# Altium footprint library ACB_PcbLib.PcbLib: 167 footprints (part 9 of 11)
Each footprint in its own frame and in the unit in brackets; x right, y up, seen from the top. Pads: shape width x height; smd on the part's side, far side on the other; paste and mask are expansions set on the pad; w line width, h text height; cw(c..) or ccw(c..) is an arc to the next point about the centre after c.
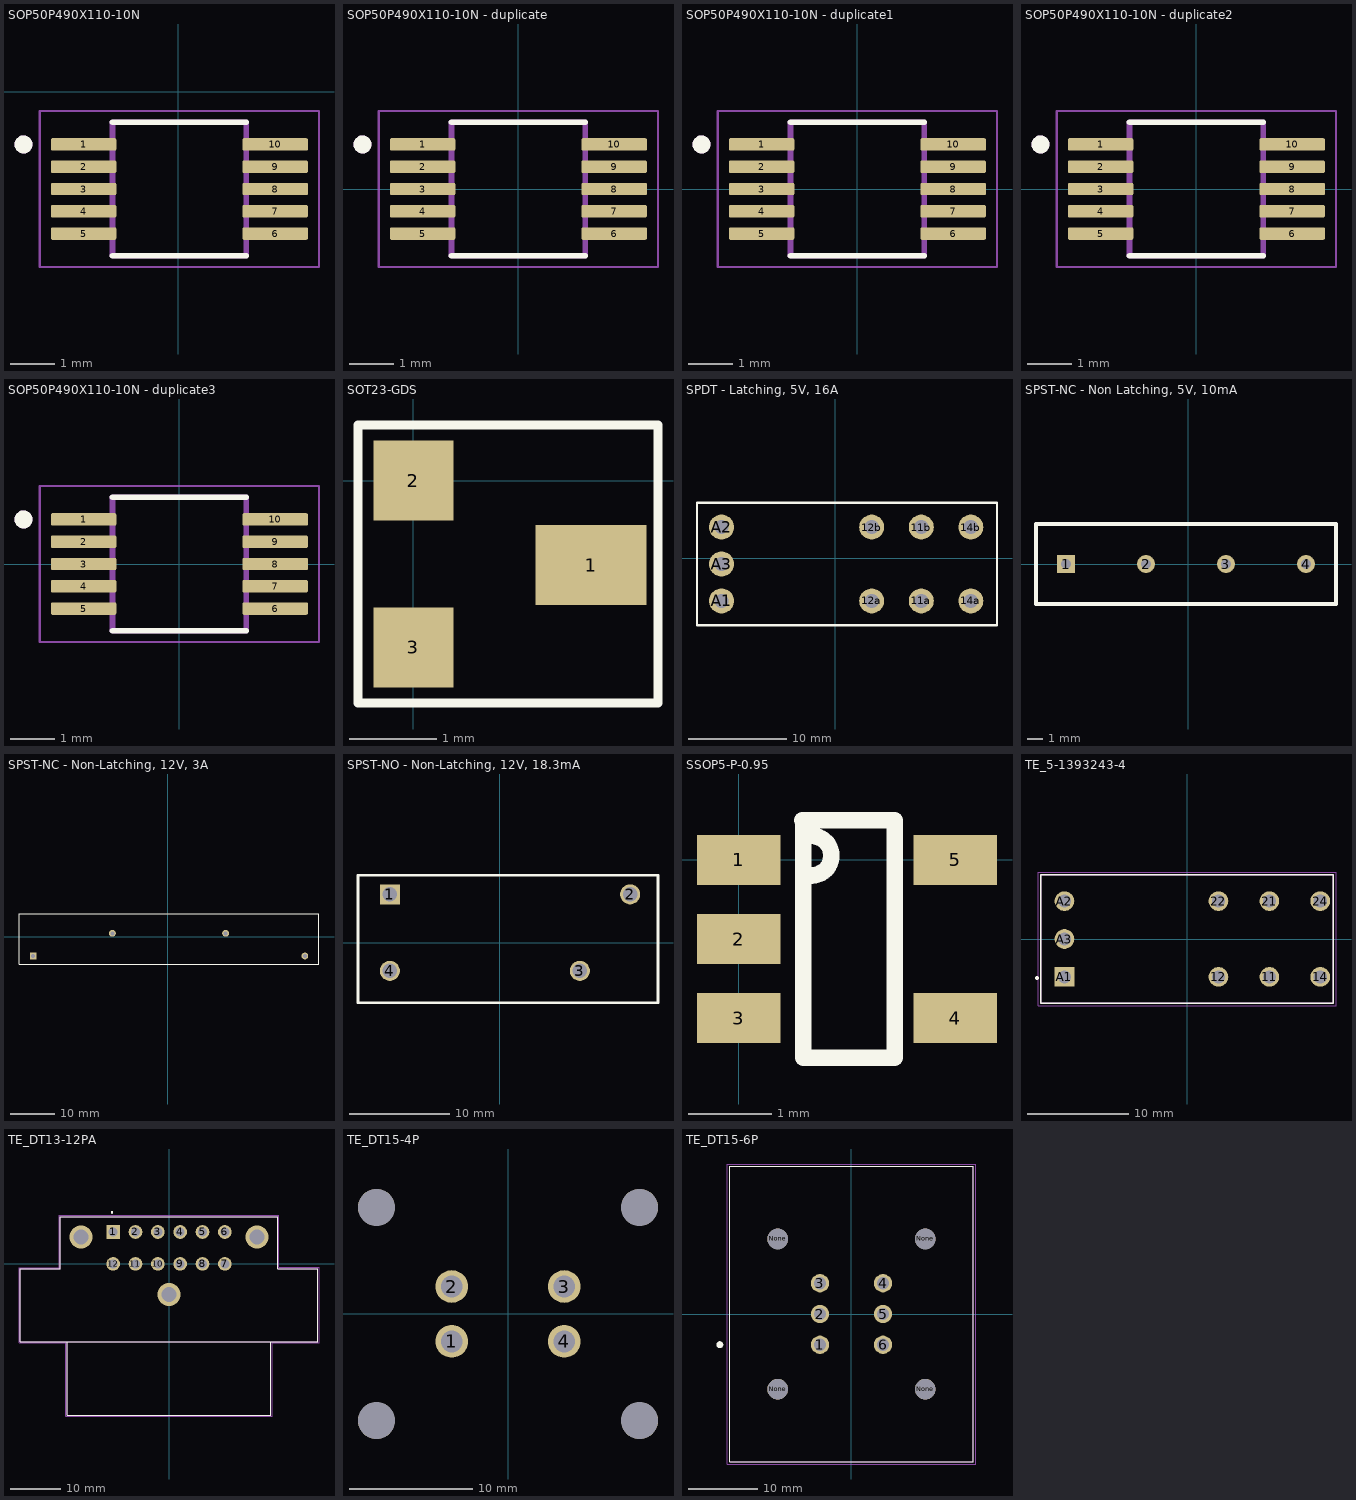
[diagram p8: the footprints below, top view; thin cyan lines are the x and y axes]

## SOP50P490X110-10N [mm]
pads (10):
  rrect25% 1.47x0.28 smd: 1(-2.124,-1.185) 2(-2.124,-1.685) 3(-2.124,-2.185) 4(-2.124,-2.685) 5(-2.124,-3.185) 6(2.176,-3.185) 7(2.176,-2.685) 8(2.176,-2.185) 9(2.176,-1.685) 10(2.176,-1.185)
Top Overlay:
  circle w0.2: c-3.474,-1.185 r0.1
  lines w0.127: -1.474,-3.685 1.526,-3.685 ; -1.474,-0.685 1.526,-0.685
Mechanical 13:
  circle w0.2: c-3.474,-1.185 r0.1
  lines w0.127: -1.474,-3.685 -1.474,-0.685 1.526,-0.685 1.526,-3.685 -1.474,-3.685
Mechanical 15:
  lines w0.05: -3.109,-3.935 -3.109,-0.435 3.161,-0.435 3.161,-3.935 -3.109,-3.935
3D body "step_temp.STEP": height 1.1, standoff 0, extent -2.424,-3.685 2.476,-0.685

## SOP50P490X110-10N - duplicate [mm]
pads (10):
  rrect25% 1.47x0.28 smd: 1(-2.15,1) 2(-2.15,0.5) 3(-2.15,0) 4(-2.15,-0.5) 5(-2.15,-1) 6(2.15,-1) 7(2.15,-0.5) 8(2.15,0) 9(2.15,0.5) 10(2.15,1)
Top Overlay:
  circle w0.2: c-3.5,1 r0.1
  lines w0.127: -1.5,-1.5 1.5,-1.5 ; -1.5,1.5 1.5,1.5
Mechanical 13:
  circle w0.2: c-3.5,1 r0.1
  lines w0.127: -1.5,-1.5 -1.5,1.5 1.5,1.5 1.5,-1.5 -1.5,-1.5
Mechanical 15:
  lines w0.05: -3.135,-1.75 -3.135,1.75 3.135,1.75 3.135,-1.75 -3.135,-1.75
3D body "step_temp.STEP": height 1.1, standoff 0, extent -2.45,-1.5 2.45,1.5

## SOP50P490X110-10N - duplicate1 [mm]
pads (10):
  rrect25% 1.47x0.28 smd: 1(-2.15,1) 2(-2.15,0.5) 3(-2.15,0) 4(-2.15,-0.5) 5(-2.15,-1) 6(2.15,-1) 7(2.15,-0.5) 8(2.15,0) 9(2.15,0.5) 10(2.15,1)
Top Overlay:
  circle w0.2: c-3.5,1 r0.1
  lines w0.127: -1.5,-1.5 1.5,-1.5 ; -1.5,1.5 1.5,1.5
Mechanical 13:
  circle w0.2: c-3.5,1 r0.1
  lines w0.127: -1.5,-1.5 1.5,-1.5 1.5,1.5 -1.5,1.5 -1.5,-1.5
Mechanical 15:
  lines w0.05: -3.135,-1.75 3.135,-1.75 3.135,1.75 -3.135,1.75 -3.135,-1.75
3D body "step_temp.STEP": height 1.1, standoff 0, extent -2.45,-1.5 2.45,1.5

## SOP50P490X110-10N - duplicate2 [mm]
pads (10):
  rrect25% 1.47x0.28 smd: 1(-2.15,1) 2(-2.15,0.5) 3(-2.15,0) 4(-2.15,-0.5) 5(-2.15,-1) 6(2.15,-1) 7(2.15,-0.5) 8(2.15,0) 9(2.15,0.5) 10(2.15,1)
Top Overlay:
  circle w0.2: c-3.5,1 r0.1
  lines w0.127: -1.5,-1.5 1.5,-1.5 ; -1.5,1.5 1.5,1.5
Mechanical 13:
  circle w0.2: c-3.5,1 r0.1
  lines w0.127: -1.5,-1.5 -1.5,1.5 1.5,1.5 1.5,-1.5 -1.5,-1.5
Mechanical 15:
  lines w0.05: -3.135,-1.75 -3.135,1.75 3.135,1.75 3.135,-1.75 -3.135,-1.75
3D body "step_temp.STEP": height 1.1, standoff 0, extent -2.45,-1.5 2.45,1.5

## SOP50P490X110-10N - duplicate3 [mm]
pads (10):
  rrect25% 1.47x0.28 smd: 1(-2.15,1) 2(-2.15,0.5) 3(-2.15,0) 4(-2.15,-0.5) 5(-2.15,-1) 6(2.15,-1) 7(2.15,-0.5) 8(2.15,0) 9(2.15,0.5) 10(2.15,1)
Top Overlay:
  circle w0.2: c-3.5,1 r0.1
  lines w0.127: -1.5,-1.5 1.5,-1.5 ; -1.5,1.5 1.5,1.5
Mechanical 13:
  circle w0.2: c-3.5,1 r0.1
  lines w0.127: -1.5,-1.5 1.5,-1.5 1.5,1.5 -1.5,1.5 -1.5,-1.5
Mechanical 15:
  lines w0.05: -3.135,-1.75 3.135,-1.75 3.135,1.75 -3.135,1.75 -3.135,-1.75
3D body "step_temp.STEP": height 1.1, standoff 0, extent -2.45,-1.5 2.45,1.5

## SOT23-GDS [mil]
pads (3):
  rect 50x36 smd: 1(80,-38)
  rect 36x36 smd: 2(0,0) 3(0,-75)
Top Overlay:
  lines w4: -24.88,11.02 -24.88,12.02 ; -24.88,15.02 -24.88,25.02 ; -10.88,25.02 -8.88,25.02 ; -9.88,25.02 -24.88,25.02 ; -24.88,25.02 110.12,25.02 110.12,-99.98 -24.88,-99.98 -24.88,25.02
3D body "SW3dPS-3-lead sot23-3.STEP": height 40.59, standoff 0.43, extent -3.48,-95 94,19.96

## SPDT - Latching, 5V, 16A [mil] "RT314F05"
height 618.11
pads (9):
  round 100 hole 57: 11a(344.21,-170.28) 11b(344.21,125) 12a(145.79,-170.28) 12b(145.79,125) 14a(542.64,-170.28) 14b(542.64,125) A1(-455,-170.28) A2(-455,125) A3(-455,-22.64)
Top Overlay:
  lines w10: -553.43,-268.7 -553.43,223.43 647.36,223.43 647.36,-268.7 -553.43,-268.7

## SPST-NC - Non Latching, 5V, 10mA [mil] "9001-05-02"
pads (4):
  rect 45x45 hole 25: 1(-305,0)
  round 45 hole 25: 2(-105,0) 3(95,0) 4(295,0)
Top Overlay:
  lines w10: -380,-100 -380,100 370,100 370,-100 -380,-100

## SPST-NC - Non-Latching, 12V, 3A [mil] "5502-12-1"
pads (4):
  rect 60x60 hole 35: 1(-1190,-170)
  round 60 hole 35: 2(-490,30) 3(510,30) 4(1210,-170)
Top Overlay:
  lines w10: -1315,-245 1335,-245 1335,205 -1315,205 -1315,-245

## SPST-NO - Non-Latching, 12V, 18.3mA [mil] "G6RL-1A DC12"
height 484.25
pads (4):
  rect 78.74x78.74 hole 57: 1(-430,190)
  round 78.74 hole 57: 2(510.94,190) 3(314.09,-110) 4(-430,-110)
Top Overlay:
  lines w10: -555,-235 620,-235 620,265 -555,265 -555,-235

## SSOP5-P-0.95 [mm]
pads (5):
  rect 1x0.6 smd: 1(0,0) 2(0,-0.95) 3(0,-1.9) 4(2.6,-1.9) 5(2.6,0)
Top Overlay:
  lines w0.2: 0.763,0.475 1.875,0.475 1.875,-2.375 0.775,-2.375 0.775,0.475 1.238,0.475 ; 0.875,-0.188 ccw(c0.875,0.05) 0.875,0.288
3D body: height 1.1, standoff 0, extent 0.497,-2.428 2.1,0.478

## TC4S584F [mm] "Inverter"

## TE_5-1393243-4 [mm]
pads (9):
  round 1.95 hole 1.3: 11(8.15,-3.75) 12(3.11,-3.75) 14(13.19,-3.75) 21(8.15,3.75) 22(3.11,3.75) 24(13.19,3.75) A2(-12.15,3.75) A3(-12.15,0)
  rect 1.95x1.95 hole 1.3: A1(-12.15,-3.75)
Top Overlay:
  circle w0.2: c-14.865,-3.87 r0.1
  lines w0.127: -14.5,-6.35 14.5,-6.35 14.5,6.35 -14.5,6.35 -14.5,-6.35
Mechanical 4:
  lines w0.127: -14.5,-6.35 14.5,-6.35 ; -14.5,-6.35 -14.5,6.35 ; -14.5,-6.35 14.5,-6.35 ; -14.5,-6.35 -14.5,6.35 ; -14.5,6.35 14.5,6.35 ; -14.5,6.35 14.5,6.35 ; 14.5,-6.35 14.5,6.35 ; 14.5,-6.35 14.5,6.35
Mechanical 16:
  lines w0.05: -14.75,-6.6 14.75,-6.6 14.75,6.6 -14.75,6.6 -14.75,-6.6
3D body: height 15.7, standoff 0, extent -14.5,-6.325 14.475,6.325

## TE_DT13-12PA [mm]
pads (12):
  rect 2.715x2.715 hole 1.81: 1(-11.115,6.35)
  round 2.715 hole 1.81: 2(-6.67,6.35) 3(-2.225,6.35) 4(2.225,6.35) 5(6.67,6.35) 6(11.115,6.35) 7(11.115,0) 8(6.67,0) 9(2.225,0) 10(-2.225,0) 11(-6.67,0) 12(-11.115,0)
via -17.54,5.34 diameter 4.572 hole 2.99
via 17.54,5.34 diameter 4.572 hole 2.99
via 0,-6.1 diameter 4.572 hole 2.99
Top Overlay:
  circle w0.2: c-11.35,10.25 r0.158
  lines w0.127: -20.28,-15.49 20.28,-15.49 ; -20.28,-15.49 -29.605,-15.49 -29.605,-1 -21.605,-1 -21.605,9.4 21.605,9.4 21.605,-1 29.605,-1 29.605,-15.49 20.28,-15.49 ; -20.28,-15.49 -20.28,-30.1 20.28,-30.1 20.28,-15.49
Mechanical 4:
  lines w0.127: -29.605,-15.49 -20.28,-15.49 ; -29.605,-15.49 -29.605,-1 ; -29.605,-15.49 -20.28,-15.49 ; -29.605,-15.49 -29.605,-1 ; -29.605,-1 -21.605,-1 ; -29.605,-1 -21.605,-1 ; -21.605,-1 -21.605,9.4 ; -21.605,-1 -21.605,9.4 ; -21.605,9.4 21.605,9.4 ; -21.605,9.4 21.605,9.4 ; -20.28,-30.1 -20.28,-15.49 ; -20.28,-30.1 20.28,-30.1 ; -20.28,-30.1 -20.28,-15.49 ; -20.28,-30.1 20.28,-30.1 ; -20.28,-15.49 20.28,-15.49 ; -20.28,-15.49 20.28,-15.49 ; 20.28,-30.1 20.28,-15.49 ; 20.28,-30.1 20.28,-15.49 ; 20.28,-15.49 29.605,-15.49 ; 20.28,-15.49 29.605,-15.49 ; 21.605,-1 21.605,9.4 ; 21.605,-1 29.605,-1 ; 21.605,-1 21.605,9.4 ; 21.605,-1 29.605,-1 ; 29.605,-15.49 29.605,-1 ; 29.605,-15.49 29.605,-1
Mechanical 16:
  lines w0.05: -29.855,-15.74 -20.53,-15.74 -20.53,-30.35 20.53,-30.35 20.53,-15.74 29.855,-15.74 29.855,-0.7 21.85,-0.7 21.85,9.65 -21.85,9.65 -21.85,-0.75 -29.855,-0.75 -29.855,-15.74
3D body "c-dt13-12pa-g003-99-3d.stp": height 35.41, standoff -3.17, extent -29.632,-30.074 29.575,9.423

## TE_DT15-4P [mm]
pads (8):
  round 2.655 hole 1.77: 1(-4.56,-2.225) 2(-4.56,2.225) 3(4.56,2.225) 4(4.56,-2.225)
  round 2.99 hole 2.99 unplated: ""(-10.67,-8.655) ""(-10.67,8.645) ""(10.67,-8.655) ""(10.67,8.645)

## TE_DT15-6P [mm]
pads (10):
  round 2.655 hole 1.77: 1(-4.56,-4.45) 2(-4.56,0) 3(-4.56,4.45) 4(4.56,4.45) 5(4.56,0) 6(4.56,-4.45)
  round 2.99 hole 2.99 unplated: None(-10.67,-10.88) None(-10.67,10.86) None(10.67,-10.88) None(10.67,10.86)
Top Overlay:
  circle w0.5: c-19.05,-4.44 r0.25
  lines w0.127: -17.625,-21.395 17.625,-21.395 17.625,21.395 -17.625,21.395 -17.625,-21.395
Mechanical 4:
  lines w0.127: -17.625,-21.395 17.625,-21.395 ; -17.625,-21.395 -17.625,21.395 ; -17.625,-21.395 17.625,-21.395 ; -17.625,-21.395 -17.625,21.395 ; -17.625,21.395 17.625,21.395 ; -17.625,21.395 17.625,21.395 ; 17.625,-21.395 17.625,21.395 ; 17.625,-21.395 17.625,21.395
Mechanical 16:
  lines w0.05: -18,-21.7 -18,21.7 18,21.7 18,-21.7 -18,-21.7